# EAGLE library part CH340E (library CH340E)
USB Serial IC Source: Datasheet <https://akizukidenshi.com/download/ds/wch/ch340.pdf>
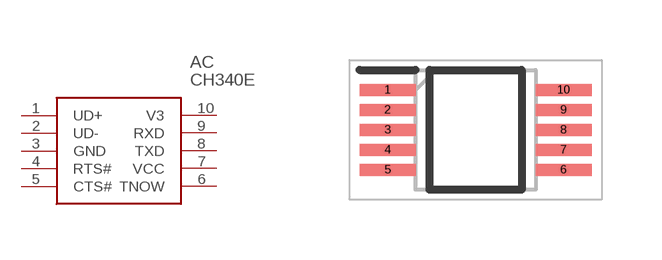
[diagram p0: symbol with the pads of SOP50P490X100-10N; footprint SOP50P490X100-10N]

Designator prefix AC

## CH340E (Description: USB Serial IC; Height: 1mm; Manufacturer_Name: WCH; Manufacturer_Part_Number: CH340E)  [SOP50P490X100-10N]
1  UD+
2  UD-
3  GND  pwr
4  RTS#  out
5  CTS#  in
6  TNOW  out
7  VCC  pwr
8  TXD  out
9  RXD  in
10  V3  pwr

## Footprint SOP50P490X100-10N (pad centres in mm)
MSOP10
smd 1.4 x 0.3: 1 -2.2,1; 2 -2.2,0.5; 3 -2.2,0; 4 -2.2,-0.5; 5 -2.2,-1; 6 2.2,-1; 7 2.2,-0.5; 8 2.2,0; 9 2.2,0.5; 10 2.2,1